# Altium schematic symbol library Schlib1.SchLib: 27 symbols
Pins are listed as number, name and electrical type; pins without a type are passive.

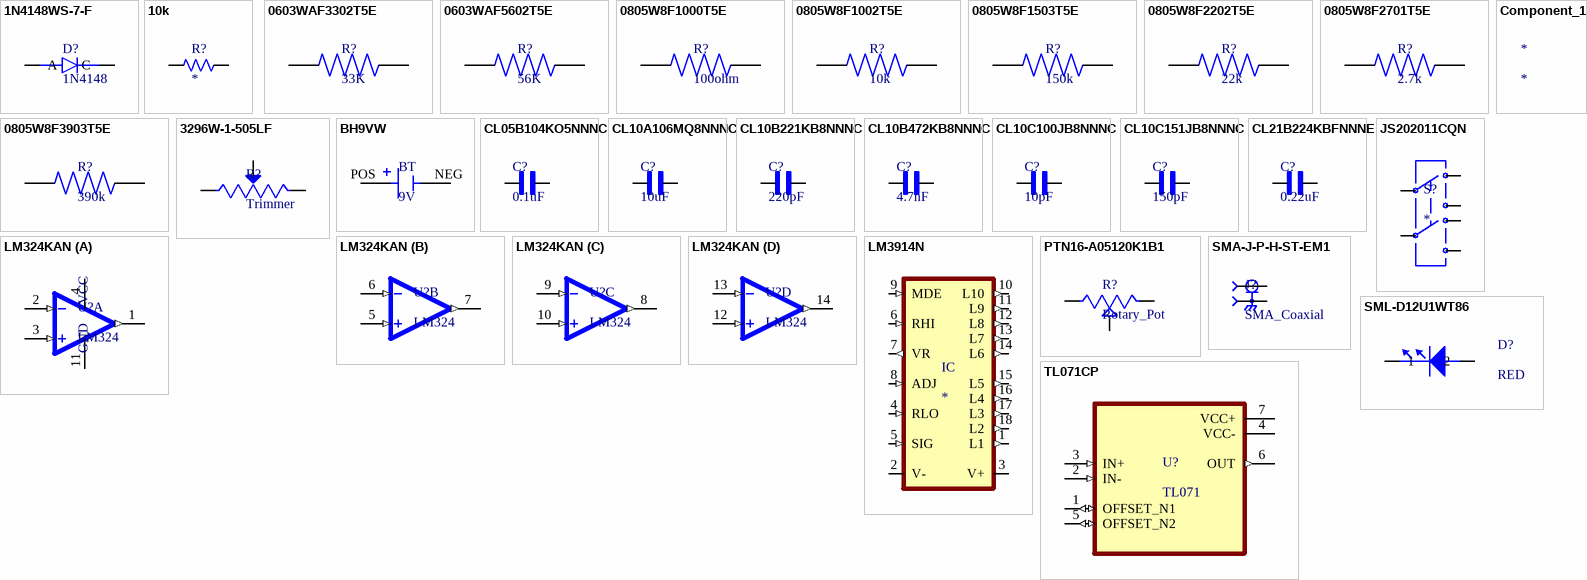
[diagram p0: symbols 1N4148WS-7-F to TL071CP]

## 1N4148WS-7-F
designator D?, comment 1N4148
Diode Switching 75V 0.3A 2-Pin SOD-323 | Diodes Inc 1N4148WS-7-F; MF: Diodes Inc.; SnapEDA_Link: https://www.snapeda.com/parts/1N4148WS-7-F/Diodes+Inc./view-part/?ref=snap; Package: SOD-323 Diodes Inc.; Value: *; MP: 1N4148WS-7-F; Check_prices: https://www.snapeda.com/parts/1N4148WS-7-F/Diodes+Inc./view-part/?ref=eda
footprint SOD2513X120N
pins: A, C

## 10k
designator R?
RES 4.3K OHM 1% 1/6W AXIAL; MF: YAGEO; MP: MFR-12FTF52-4K3; SnapEDA_Link: https://www.snapeda.com/parts/MFR-12FTF52-4K3/Yageo/view-part/?ref=snap; Package: RADIAL-2 Yageo; Value: *; Check_prices: https://www.snapeda.com/parts/MFR-12FTF52-4K3/Yageo/view-part/?ref=eda
footprint BigRes
pins: 1, 2

## 0603WAF3302T5E
designator R?, comment 33K
33K Ohm 1/10W Thick Film Resistor 0603 Chip - Surface Mount; MF: Uni-Royal; MP: 0603WAF3302T5E; SnapEDA_Link: https://www.snapeda.com/parts/0603WAF3302T5E/Uni-Royal/view-part/?ref=snap; Package: 0603-2 ROYAL; Value: *; Check_prices: https://www.snapeda.com/parts/0603WAF3302T5E/Uni-Royal/view-part/?ref=eda
footprint RESC1608X55N
pins: 1, 2

## 0603WAF5602T5E
designator R?, comment 56K
56K Ohm 1/10W Thick Film Resistor 0603 Chip - Surface Mount; MF: Uni-Royal; MP: 0603WAF5602T5E; SnapEDA_Link: https://www.snapeda.com/parts/0603WAF5602T5E/Uni-Royal/view-part/?ref=snap; Package: None; Value: *; Check_prices: https://www.snapeda.com/parts/0603WAF5602T5E/Uni-Royal/view-part/?ref=eda
footprint RESC1608X55N
pins: 1, 2

## 0805W8F1000T5E
designator R?, comment 100ohm
100 Ohm 1/8W Thick Film Resistor 0805 Chip - Surface Mount; MF: Uni-Royal; MP: 0805W8F1000T5E; SnapEDA_Link: https://www.snapeda.com/parts/0805W8F1000T5E/Uni-Royal/view-part/?ref=snap; Package: 0805-2 ROYAL; Value: *; Check_prices: https://www.snapeda.com/parts/0805W8F1000T5E/Uni-Royal/view-part/?ref=eda
footprint RESC2012X65N
pins: 1, 2

## 0805W8F1002T5E
designator R?, comment 10k
10K Ohm 1/8W Thick Film Resistor 0805 Chip - Surface Mount; MF: Uni-Royal; MP: 0805W8F1002T5E; SnapEDA_Link: https://www.snapeda.com/parts/0805W8F1002T5E/Uni-Royal/view-part/?ref=snap; Package: 0805-2 ROYAL; Value: *; Check_prices: https://www.snapeda.com/parts/0805W8F1002T5E/Uni-Royal/view-part/?ref=eda
footprint RESC2012X65N
pins: 1, 2

## 0805W8F1503T5E
designator R?, comment 150k
150K Ohm 1/8W Thick Film Resistor 0805 Chip - Surface Mount; MF: Uni-Royal; MP: 0805W8F1503T5E; SnapEDA_Link: https://www.snapeda.com/parts/0805W8F1503T5E/Uni-Royal/view-part/?ref=snap; Package: 0805-2 ROYAL; Value: *; Check_prices: https://www.snapeda.com/parts/0805W8F1503T5E/Uni-Royal/view-part/?ref=eda
footprint RESC2012X65N
pins: 1, 2

## 0805W8F2202T5E
designator R?, comment 22k
22K Ohm 1/8W Thick Film Resistor 0805 Chip - Surface Mount; MF: Uni-Royal; MP: 0805W8F2202T5E; SnapEDA_Link: https://www.snapeda.com/parts/0805W8F2202T5E/Uni-Royal/view-part/?ref=snap; Package: 0805-2 ROYAL; Value: *; Check_prices: https://www.snapeda.com/parts/0805W8F2202T5E/Uni-Royal/view-part/?ref=eda
footprint RESC2012X65N
pins: 1, 2

## 0805W8F2701T5E
designator R?, comment 2.7k
2.7K Ohm 1/8W Thick Film Resistor 0805 Chip - Surface Mount; MF: Uni-Royal; MP: 0805W8F2701T5E; SnapEDA_Link: https://www.snapeda.com/parts/0805W8F2701T5E/Uni-Royal/view-part/?ref=snap; Package: None; Value: *; Check_prices: https://www.snapeda.com/parts/0805W8F2701T5E/Uni-Royal/view-part/?ref=eda
footprint RESC2012X65N
pins: 1, 2

## 0805W8F3903T5E
designator R?, comment 390k
390K Ohm 1/8W Thick Film Resistor 0805 Chip - Surface Mount; MF: Uni-Royal; MP: 0805W8F3903T5E; SnapEDA_Link: https://www.snapeda.com/parts/0805W8F3903T5E/Uni-Royal/view-part/?ref=snap; Package: 0805-2 ROYAL; Value: *; Check_prices: https://www.snapeda.com/parts/0805W8F3903T5E/Uni-Royal/view-part/?ref=eda
footprint RESC2012X65N
pins: 1, 2

## 3296W-1-505LF
designator R?, comment Trimmer
TRIMMER,CERMET,REST 5M OHMS,PCB,25 TURNS,PWR-RTG 0.5W | Bourns 3296W-1-505LF; SnapEDA_Link: https://www.snapeda.com/parts/3296W-1-505LF/Bourns/view-part/?ref=snap; Package: NON STANDARD-3 Bourns; Value: *; MF: Bourns; MP: 3296W-1-505LF; Check_prices: https://www.snapeda.com/parts/3296W-1-505LF/Bourns/view-part/?ref=eda
footprint TRIM_3296W-1-505LF
pins: 1 CCW, 2 WIPER, 3 CW

## BH9VW
designator BT, comment 9V
Battery Holder _Open_ 9V 1 Cell Wire Leads - 6 _152.4mm_; MF: MPD; MP: BH9VW; Value: *; Package: None; Price: None; SnapEDA_Link: https://www.snapeda.com/parts/BH9VW/MPD/view-part/4480509/?ref=snap; Availability: Unavailable
footprint BAT_BH9VW
pins: NEG, POS

## CL05B104KO5NNNC
designator C?, comment 0.1uF
0.1 ÂµF Â±10% 16V Ceramic Capacitor X7R 0402 (1005 Metric); MF: Samsung; MP: CL05B104KO5NNNC; SnapEDA_Link: https://www.snapeda.com/parts/CL05B104KO5NNNC/Samsung/view-part/?ref=snap; Package: SMD-2 Samsung; Value: *; Check_prices: https://www.snapeda.com/parts/CL05B104KO5NNNC/Samsung/view-part/?ref=eda
footprint CAPC1005X55N
pins: 1, 2

## CL10A106MQ8NNNC
designator C?, comment 10uF
10 ÂµF Â±20% 6.3V Ceramic Capacitor X5R 0603 (1608 Metric); MF: Samsung Electro-Mechanics; MP: CL10A106MQ8NNNC; SnapEDA_Link: https://www.snapeda.com/parts/CL10A106MQ8NNNC/Samsung/view-part/?ref=snap; Package: SMD-2 Samsung; Value: *; Check_prices: https://www.snapeda.com/parts/CL10A106MQ8NNNC/Samsung/view-part/?ref=eda
footprint CAPC1608X90N
pins: 1, 2

## CL10B221KB8NNNC
designator C?, comment 220pF
220 pF Â±10% 50V Ceramic Capacitor X7R 0603 (1608 Metric); MF: Samsung Electro-Mechanics; MP: CL10B221KB8NNNC; SnapEDA_Link: https://www.snapeda.com/parts/CL10B221KB8NNNC/Samsung/view-part/?ref=snap; Package: SMD-2 Samsung; Value: *; Check_prices: https://www.snapeda.com/parts/CL10B221KB8NNNC/Samsung/view-part/?ref=eda
footprint CAPC1608X90N
pins: 1, 2

## CL10B472KB8NNNC
designator C?, comment 4.7nF
Ceramic capacitor SMD 0603 4.7 nF 50 V 10 % Samsung Electro-Mechanics CL10B472KB8NNNC 4000 pc(s); SnapEDA_Link: https://www.snapeda.com/parts/CL10B472KB8NNNC/Samsung/view-part/?ref=snap; Package: SMD-2 Samsung; Value: *; MF: Samsung Electro-Mechanics; MP: CL10B472KB8NNNC; Check_prices: https://www.snapeda.com/parts/CL10B472KB8NNNC/Samsung/view-part/?ref=eda
footprint CAPC1608X90N
pins: 1, 2

## CL10C100JB8NNNC
designator C?, comment 10pF
10 pF Â±5% 50V Ceramic Capacitor C0G, NP0 0603 (1608 Metric); MF: Samsung; MP: CL10C100JB8NNNC; SnapEDA_Link: https://www.snapeda.com/parts/CL10C100JB8NNNC/Samsung/view-part/?ref=snap; Package: SMD-2 Samsung; Value: *; Check_prices: https://www.snapeda.com/parts/CL10C100JB8NNNC/Samsung/view-part/?ref=eda
footprint CAPC1608X90N
pins: 1, 2

## CL10C151JB8NNNC
designator C?, comment 150pF
150 pF Â±5% 50V Ceramic Capacitor C0G, NP0 0603 (1608 Metric); MF: Samsung Electro-Mechanics; MP: CL10C151JB8NNNC; SnapEDA_Link: https://www.snapeda.com/parts/CL10C151JB8NNNC/Samsung/view-part/?ref=snap; Package: SMD-2 Samsung; Value: *; Check_prices: https://www.snapeda.com/parts/CL10C151JB8NNNC/Samsung/view-part/?ref=eda
footprint CAPC1608X90N
pins: 1, 2

## CL21B224KBFNNNE
designator C?, comment 0.22uF
0.22 ÂµF Â±10% 50V Ceramic Capacitor X7R 0805 (2012 Metric); MF: Samsung Electro-Mechanics; MP: CL21B224KBFNNNE; SnapEDA_Link: https://www.snapeda.com/parts/CL21B224KBFNNNE/Samsung/view-part/?ref=snap; Package: SMD-2 Samsung; Value: *; Check_prices: https://www.snapeda.com/parts/CL21B224KBFNNNE/Samsung/view-part/?ref=eda
footprint CAPC2012X135N
pins: 1, 2

## Component_1
designator *

## JS202011CQN
designator S?
Switch, Slide, DPDT, ON-ON, Top Slide, 300mA, 6VDC, ThruHole, PC Pin | C&K JS202011CQN; SnapEDA_Link: https://www.snapeda.com/parts/JS202011CQN/C%2526K/view-part/?ref=snap; Package: None; Value: *; MF: C&K; MP: JS202011CQN; Check_prices: https://www.snapeda.com/parts/JS202011CQN/C%2526K/view-part/?ref=eda
footprint SPARKFUN-RETIRED_SWITCH-2.5X3.2-6
pins: 1 (io), 2 (io), 3 (io), 4 (io), 5 (io), 6 (io)

## LM324KAN
designator U?, comment LM324
Quad, 30-V, 1.2-MHz, 3-mV offset voltage, improved ESD (2 kV) operational amplifier; MF: Texas Instruments; MP: LM324KAN; SnapEDA_Link: https://www.snapeda.com/parts/LM324KAN/Texas+Instruments/view-part/?ref=snap; Package: PDIP-14 Texas Instruments; Value: *; Check_prices: https://www.snapeda.com/parts/LM324KAN/Texas+Instruments/view-part/?ref=eda
footprint DIP794W45P254L1969H508Q14
part A pins: 1 1OUT (out), 2 1IN- (in), 3 1IN+ (in), 4 VCC (power), 11 GND (power)
part B pins: 5 2IN+ (in), 6 2IN- (in), 7 2OUT (out)
part C pins: 8 3OUT (out), 9 3IN- (in), 10 3IN+ (in)
part D pins: 12 4IN+ (in), 13 4IN- (in), 14 4OUT (out)

## LM3914N
designator IC
LED Lighting Drivers; MP: LM3914N; MF: Texas Instruments; Package: None; Price: None; Availability: Unavailable; Value: *; SnapEDA_Link: https://www.snapeda.com/parts/LM3914N/Texas%20Instruments/view-part/4652973/?ref=snap
footprint DIL18
pins: 1 L1 (out), 2 V- (power), 3 V+ (power), 4 RLO (in), 5 SIG (in), 6 RHI (in), 7 VR (out), 8 ADJ (in), 9 MDE (in), 10 L10 (out), 11 L9 (out), 12 L8 (out), 13 L7 (out), 14 L6 (out), 15 L5 (out), 16 L4 (out), 17 L3 (out), 18 L2 (out)

## PTN16-A05120K1B1
designator R?, comment Rotary_Pot
16.5 mm, Horizontal, Linear, 5 kÎ©, Through Hole, Knurled Shaft Single Section Rotary Potentiometer; MF: Same Sky; MP: PTN16-A05120K1B1; SnapEDA_Link: https://www.snapeda.com/parts/PTN16-A05120K1B1/Same+Sky/view-part/?ref=snap; Package: Package; Value: *; Check_prices: https://www.snapeda.com/parts/PTN16-A05120K1B1/Same+Sky/view-part/?ref=eda
footprint POT_PTN16-A05120K1B1
pins: 1, 2, 3

## SMA-J-P-H-ST-EM1
designator J?, comment SMA_Coaxial
SMA Connector Jack, Female Socket 50 Ohms Board Edge, End Launch Solder; MF: Samtec; MP: SMA-J-P-H-ST-EM1; SnapEDA_Link: https://www.snapeda.com/parts/SMA-J-P-H-ST-EM1/Samtec+Inc./view-part/?ref=snap; Package: None; Check_prices: https://www.snapeda.com/parts/SMA-J-P-H-ST-EM1/Samtec+Inc./view-part/?ref=eda; Value: *
footprint SAMTEC_SMA-J-P-H-ST-EM1
pins: 1, 2_1 2, 2_2 2, 3_1 2, 3_2 2

## SML-D12U1WT86
designator D?, comment RED
LED Uni-Color Red 2-Pin Chip 0603(1608Metric) T/R; Manufacturer: ROHM; Manufacturer Part Number: SML-D12U1WT86; Dominant Wavelength: 620nm; Forward Current: 20mA; Forward Voltage: 2.2V; Lens Color: White; Lens Transparency: Diffused; Luminous Flux: 1Zlm; Luminous Intensity: 63mcd; Number of Circuits: 1; Power Dissipation: 54mW; Reverse Voltage: 5V; Shape: Rectangular; Supplier: Arrow Electronics; Supplier Part Number: SML-D12U1WT86; RoHS: Compliant; Category: Optoelectronics; Stock: 11255; Pricing: 49=0.0757, 100=0.0539, 500=0.0424, 1000=0.0386, 3000=0.0317, 6000=0.0313 (USD); Case/Package: 1608; Case Code (Imperial): 0603; Case Code (Metric): 1608; Color: Red; Country of Origin: Japan, Mainland China, Malaysia; Export Control Classification Number (ECCN) Code: EAR99; Height: 550µm; Harmonized Tariff Schedule (HTS) Code: 8541.40.20.00; Introduction Date: 2016-04-18; Lead Free: Lead Free; Length: 1.6mm; Lifecycle Status: Production; Max Operating Temperature: 85°C; Min Operating Temperature: -40°C; Mounting Technology: Surface Mount; Number of Terminals: 2; REACH SVHC: Yes; Terminal Pitch: 1.65mm; Test Current: 20mA; Wavelength: 620nm; Width: 800µm; ComponentLink1URL: https://datasheet.octopart.com:443/SML-D12U1WT86-ROHM-datasheet-175953608.pdf?src-supplier=Future+Electronics; ComponentLink1Description: https://datasheet.octopart.com:443/SML-D12U1WT86-ROHM-datasheet-175953608.pdf?src-supplier=Future+Electronics; ComponentLink2URL: https://datasheet.octopart.com:443/SML-D12U1WT86-Rohm-datasheet-68298509.pdf?src-supplier=Future+Electronics; ComponentLink2Description: https://datasheet.octopart.com:443/SML-D12U1WT86-Rohm-datasheet-68298509.pdf?src-supplier=Future+Electronics; ComponentLink3URL: https://datasheet.octopart.com:443/SML-D12U1WT86-Rohm-datasheet-62059860.pdf?src-supplier=Future+Electronics; ComponentLink3Description: https://datasheet.octopart.com:443/SML-D12U1WT86-Rohm-datasheet-62059860.pdf?src-supplier=Future+Electronics; ComponentLink4URL: https://datasheet.octopart.com:443/SML-D12U1WT86-Rohm-datasheet-138791993.pdf?src-supplier=Upverter; ComponentLink4Description: https://datasheet.octopart.com:443/SML-D12U1WT86-Rohm-datasheet-138791993.pdf?src-supplier=Upverter; ComponentLink5URL: https://datasheet.octopart.com:443/SML-D12U1WT86-ROHM-datasheet-142144710.pdf?src-supplier=TME; ComponentLink5Description: https://datasheet.octopart.com:443/SML-D12U1WT86-ROHM-datasheet-142144710.pdf?src-supplier=TME; ComponentLink6URL: https://datasheet.octopart.com:443/SML-D12U1WT86-Rohm-datasheet-142144708.pdf?src-supplier=Rohm+SCT; ComponentLink6Description: https://datasheet.octopart.com:443/SML-D12U1WT86-Rohm-datasheet-142144708.pdf?src-supplier=Rohm+SCT
footprint WL-TMRC_5MM
pins: 1, 2

## TL071CP
designator U?, comment TL071
Single, 30-V, 3-MHz, high slew rate (13-V/Âµs), In to V+, JFET-input op amp; MF: Texas Instruments; MP: TL071CP; SnapEDA_Link: https://www.snapeda.com/parts/TL071CP/Texas+Instruments/view-part/?ref=snap; Package: PDIP-8 Texas; Value: *; Check_prices: https://www.snapeda.com/parts/TL071CP/Texas+Instruments/view-part/?ref=eda
footprint DIP794W45P254L959H508Q8
pins: 1 OFFSET_N1 (io), 2 IN- (in), 3 IN+ (in), 4 VCC- (power), 5 OFFSET_N2 (io), 6 OUT (out), 7 VCC+ (power)